# Altium footprint library Batterie_footprint.PcbLib: 69 footprints (part 4 of 5)
Each footprint in its own frame and in the unit in brackets; x right, y up, seen from the top. Pads: shape width x height; smd on the part's side, far side on the other; paste and mask are expansions set on the pad; w line width, h text height; cw(c..) or ccw(c..) is an arc to the next point about the centre after c.
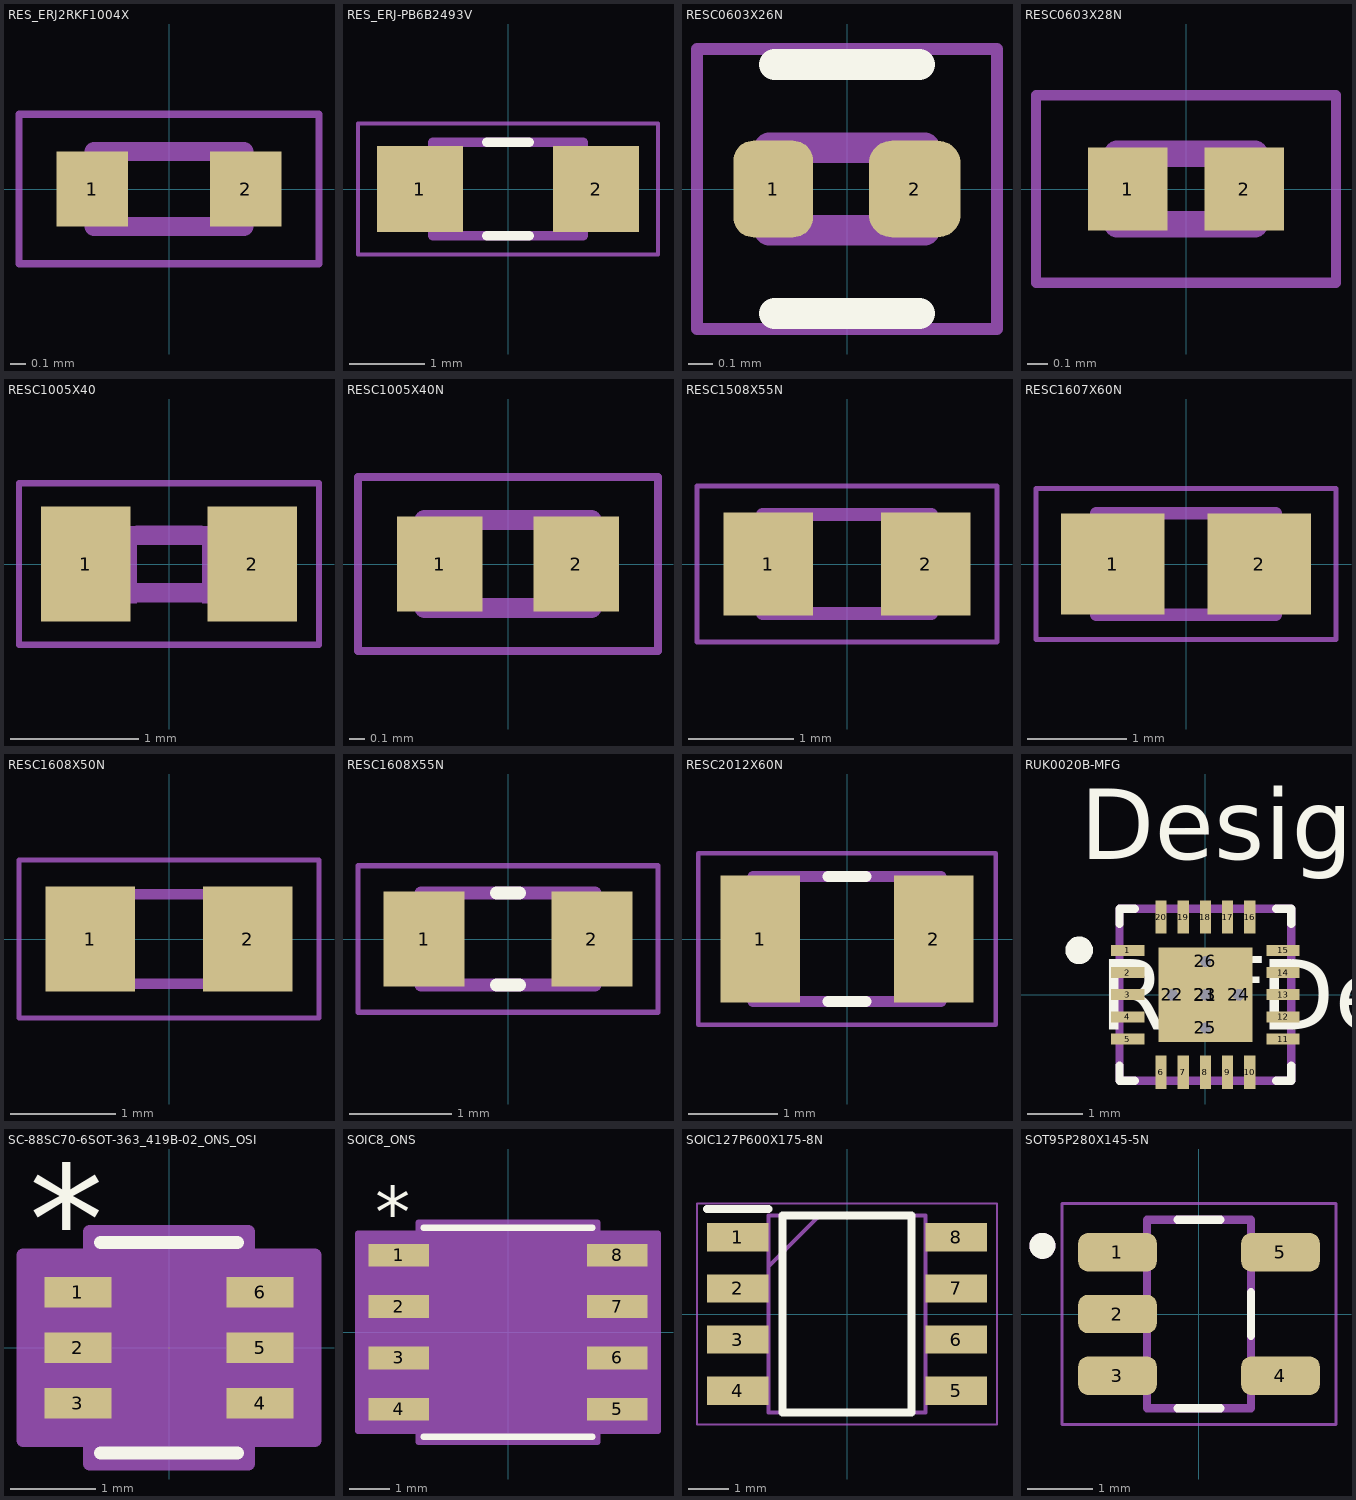
[diagram p3: the footprints below, top view; thin cyan lines are the x and y axes]

## RES_ERJ2RKF1004X [mm]
height 0.35
pads (2):
  rect 0.475x0.5 smd: 1(-0.512,0) 2(0.512,0)
Mechanical 13:
  lines w0.127: -0.5,-0.25 -0.5,0.25 0.5,0.25 0.5,-0.25 -0.5,-0.25
Mechanical 15:
  lines w0.05: -1,-0.5 -1,0.5 1,0.5 1,-0.5 -1,-0.5
3D body "step_temp.STEP": height 0.35, standoff 0, extent -0.5,-0.25 0.5,0.25

## RES_ERJ-PB6B2493V [mm]
height 0.55
pads (2):
  rect 1.15x1.15 smd: 1(-1.175,0) 2(1.175,0)
Top Overlay:
  lines w0.127: -0.28,-0.625 0.28,-0.625 ; -0.28,0.625 0.28,0.625
Mechanical 13:
  lines w0.127: -1,-0.625 1,-0.625 1,0.625 -1,0.625 -1,-0.625
Mechanical 15:
  lines w0.05: -2,-0.875 2,-0.875 2,0.875 -2,0.875 -2,-0.875

## RESC0603X26N [mm]
pads (2):
  rrect50% 0.33x0.4 smd: 1(-0.305,0)
  rrect50% 0.38x0.4 smd: 2(0.28,0)
Top Overlay:
  lines w0.127: -0.3,-0.515 0.3,-0.515 ; -0.3,0.515 0.3,0.515
Mechanical 13:
  lines w0.127: -0.32,-0.17 -0.32,0.17 0.32,0.17 0.32,-0.17 -0.32,-0.17
Mechanical 15:
  lines w0.05: -0.62,-0.579 -0.62,0.579 0.62,0.579 0.62,-0.579 -0.62,-0.579
3D body "step_temp.STEP": height 0.26, standoff 0, extent -0.3,-0.15 0.3,0.15

## RESC0603X28N [mm]
pads (2):
  rect 0.38x0.4 smd paste+0 mask+0.102: 1(-0.28,0) 2(0.28,0)
Mechanical 13:
  lines w0.127: -0.33,-0.17 0.33,-0.17 0.33,0.17 -0.33,0.17 -0.33,-0.17
Mechanical 15:
  lines w0.05: -0.72,-0.45 0.72,-0.45 0.72,0.45 -0.72,0.45 -0.72,-0.45
3D body "step_temp.STEP": height 0.28, standoff 0, extent -0.3,-0.15 0.3,0.15

## RESC1005X40 [mm]
pads (2):
  rect 0.7x0.9 smd: 1(-0.65,0) 2(0.65,0)
Mechanical 13:
  region: -0.254,-0.305 -0.555,-0.305 -0.555,0.295 -0.254,0.295
  region: 0.559,-0.305 0.259,-0.305 0.259,0.295 0.559,0.295
  lines w0.152: -0.245,-0.224 0.245,-0.224 ; -0.245,0.224 0.245,0.224
Mechanical 15:
  lines w0.051: -1.173,-0.633 1.173,-0.633 1.173,0.633 -1.173,0.633 -1.173,-0.633
3D body "step_temp.STEP": height 0.4, standoff 0, extent -0.5,-0.25 0.5,0.25

## RESC1005X40N [mm]
pads (2):
  rect 0.54x0.6 smd: 1(-0.432,0) 2(0.432,0)
Mechanical 13:
  lines w0.127: -0.53,-0.28 0.53,-0.28 0.53,0.28 -0.53,0.28 -0.53,-0.28
Mechanical 15:
  lines w0.05: -0.95,-0.55 0.95,-0.55 0.95,0.55 -0.95,0.55 -0.95,-0.55
3D body "step_temp.STEP": height 0.4, standoff 0, extent -0.5,-0.25 0.5,0.25

## RESC1508X55N [mm]
pads (2):
  rect 0.85x0.98 smd: 1(-0.75,0) 2(0.75,0)
Mechanical 13:
  lines w0.127: -0.8,-0.47 -0.8,0.47 0.8,0.47 0.8,-0.47 -0.8,-0.47
Mechanical 15:
  lines w0.05: -1.425,-0.74 -1.425,0.74 1.425,0.74 1.425,-0.74 -1.425,-0.74

## RESC1607X60N [mm]
pads (2):
  rect 1.04x1.02 smd: 1(-0.735,0) 2(0.735,0)
Mechanical 13:
  lines w0.127: -0.9,-0.51 0.9,-0.51 0.9,0.51 -0.9,0.51 -0.9,-0.51
Mechanical 15:
  lines w0.05: -1.508,-0.761 1.508,-0.761 1.508,0.761 -1.508,0.761 -1.508,-0.761
3D body "step_temp.STEP": height 0.55, standoff 0, extent -0.8,-0.4 0.8,0.4

## RESC1608X50N [mm]
pads (2):
  rect 0.85x1 smd: 1(-0.75,0) 2(0.75,0)
Mechanical 15:
  lines w0.1: -0.788,-0.425 0.788,-0.425 0.788,0.425 -0.788,0.425 -0.788,-0.425
Mechanical 20:
  lines w0.05: -1.425,-0.75 1.425,-0.75 1.425,0.75 -1.425,0.75 -1.425,-0.75

## RESC1608X55N [mm]
pads (2):
  rect 0.79x0.93 smd: 1(-0.82,0) 2(0.82,0)
Top Overlay:
  lines w0.127: -0.11,-0.45 0.11,-0.45 ; -0.11,0.45 0.11,0.45
Mechanical 13:
  lines w0.127: -0.85,-0.45 -0.85,0.45 0.85,0.45 0.85,-0.45 -0.85,-0.45
Mechanical 15:
  lines w0.05: -1.465,-0.715 -1.465,0.715 1.465,0.715 1.465,-0.715 -1.465,-0.715
3D body "step_temp.STEP": height 0.55, standoff 0, extent -0.8,-0.4 0.8,0.4

## RESC2012X60N [mm]
pads (2):
  rect 0.89x1.42 smd: 1(-0.97,0) 2(0.97,0)
Top Overlay:
  lines w0.127: -0.21,-0.7 0.21,-0.7 ; -0.21,0.7 0.21,0.7
Mechanical 13:
  lines w0.127: -1.05,-0.7 1.05,-0.7 1.05,0.7 -1.05,0.7 -1.05,-0.7
Mechanical 15:
  lines w0.05: -1.665,-0.96 1.665,-0.96 1.665,0.96 -1.665,0.96 -1.665,-0.96

## RUK0020B-MFG [mm]
pads (26):
  rect 0.6x0.2 smd paste+0 mask+0: 1(-1.4,0.8) 2(-1.4,0.4) 3(-1.4,0) 4(-1.4,-0.4) 5(-1.4,-0.8) 11(1.4,-0.8) 12(1.4,-0.4) 13(1.4,0) 14(1.4,0.4) 15(1.4,0.8)
  rect 0.2x0.6 smd paste+0 mask+0: 6(-0.8,-1.4) 7(-0.4,-1.4) 8(0,-1.4) 9(0.4,-1.4) 10(0.8,-1.4) 16(0.8,1.4) 17(0.4,1.4) 18(0,1.4) 19(-0.4,1.4) 20(-0.8,1.4)
  rect 1.7x1.7 smd paste-0.837 mask+0: 21(0,0)
  round 0.5 / inner round 1.524 / far side round 0.5 hole 0.203 paste-2539.97 mask-0.241: 22(-0.6,0) 23(0,0) 24(0.6,0) 25(0,-0.6) 26(0,0.6)
Top Overlay:
  circle w0.25: c-2.275,0.8 r0.125
  lines w0.15: -1.55,-1.275 -1.55,-1.55 -1.275,-1.55 ; -1.55,1.275 -1.55,1.55 -1.275,1.55 ; 1.275,-1.55 1.55,-1.55 1.55,-1.275 ; 1.275,1.55 1.55,1.55 1.55,1.275
  text "Designator718" at -2.261,2.438 h1.27
  text "RefDes" at -1.905,-0.635 h1.27
Top Paste:
  region: -0.795,0.845 -0.145,0.845 -0.095,0.795 -0.095,0.145 -0.145,0.095 -0.795,0.095 -0.845,0.145 -0.845,0.795
  region: 0.095,0.145 0.095,0.795 0.145,0.845 0.795,0.845 0.845,0.795 0.845,0.145 0.795,0.095 0.145,0.095
  region: -0.145,-0.845 -0.795,-0.845 -0.845,-0.795 -0.845,-0.145 -0.795,-0.095 -0.145,-0.095 -0.095,-0.145 -0.095,-0.795
  region: 0.095,-0.795 0.095,-0.145 0.145,-0.095 0.795,-0.095 0.845,-0.145 0.845,-0.795 0.795,-0.845 0.145,-0.845
Mechanical 13:
  lines w0.15: -1.55,-1.55 1.55,-1.55 1.55,1.55 -1.55,1.55 -1.55,-1.55
3D body "RUK0020B.stp": height 0.8, standoff 0, extent -1.5,-1.5 1.5,1.5

## SC-88SC70-6SOT-363_419B-02_ONS_OSI [mm]
pads (6):
  rect 0.782x0.355 smd paste+0 mask+0: 1(-1.064,0.65) 2(-1.064,0) 3(-1.064,-0.65) 4(1.064,-0.65) 5(1.064,0) 6(1.064,0.65)
Top Overlay:
  lines w0.152: -0.8,-1.232 0.8,-1.232 ; -0.8,1.232 0.8,1.232
  text ".Designator" at -3.492,-0.635 h1.27
  text "*" at -1.636,0.878 h1.27
Mechanical 13:
  lines w0.025: -0.305,1.105 ccw(c0,1.105) 0.305,1.105 ; -1.105,-0.802 -1.105,-0.498 -0.673,-0.498 -0.673,-0.802 -1.105,-0.802 ; -1.105,-0.152 -1.105,0.152 -0.673,0.152 -0.673,-0.152 -1.105,-0.152 ; -1.105,0.498 -1.105,0.802 -0.673,0.802 -0.673,0.498 -1.105,0.498 ; -0.673,-1.105 0.673,-1.105 0.673,1.105 -0.673,1.105 -0.673,-1.105 ; 0.673,-0.802 0.673,-0.498 1.105,-0.498 1.105,-0.802 0.673,-0.802 ; 0.673,-0.152 0.673,0.152 1.105,0.152 1.105,-0.152 0.673,-0.152 ; 0.673,0.498 0.673,0.802 1.105,0.802 1.105,0.498 0.673,0.498
  text "*" at -0.61,-0.241 h1.27
  text ".Designator" at -3.492,-0.635 h1.27
Mechanical 15:
  region: -0.927,-1.081 -1.709,-1.081 -1.709,1.081 -0.927,1.081 -0.927,1.359 0.927,1.359 0.927,1.081 1.709,1.081 1.709,-1.081 0.927,-1.081 0.927,-1.359 -0.927,-1.359
  lines w0.152: -1.709,-1.081 -1.709,1.081 -0.927,1.081 -0.927,1.359 0.927,1.359 0.927,1.081 1.709,1.081 1.709,-1.081 0.927,-1.081 0.927,-1.359 -0.927,-1.359 -0.927,-1.081 -1.709,-1.081
3D body "SC-88SC70-6SOT-363_419B-02_ONS_OSI.step": height 1.09, standoff 0, extent -1.105,-1.105 1.105,1.105

## SOIC8_ONS [mm]
pads (8):
  rect 1.493x0.558 smd paste+0 mask+0: 1(-2.702,1.905) 2(-2.702,0.635) 3(-2.702,-0.635) 4(-2.702,-1.905) 5(2.702,-1.905) 6(2.702,-0.635) 7(2.702,0.635) 8(2.702,1.905)
Top Overlay:
  lines w0.152: -2.083,-2.578 2.083,-2.578 ; -2.083,2.578 2.083,2.578
  text ".Designator" at -3.492,-0.635 h1.27
  text "*" at -3.274,2.336 h1.27
Mechanical 13:
  lines w0.025: -0.305,2.451 ccw(c0,2.451) 0.305,2.451 ; -3.099,-2.159 -3.099,-1.651 -1.956,-1.651 -1.956,-2.159 -3.099,-2.159 ; -3.099,-0.889 -3.099,-0.381 -1.956,-0.381 -1.956,-0.889 -3.099,-0.889 ; -3.099,0.381 -3.099,0.889 -1.956,0.889 -1.956,0.381 -3.099,0.381 ; -3.099,1.651 -3.099,2.159 -1.956,2.159 -1.956,1.651 -3.099,1.651 ; -1.956,-2.451 1.956,-2.451 1.956,2.451 -1.956,2.451 -1.956,-2.451 ; 1.956,-2.159 1.956,-1.651 3.099,-1.651 3.099,-2.159 1.956,-2.159 ; 1.956,-0.889 1.956,-0.381 3.099,-0.381 3.099,-0.889 1.956,-0.889 ; 1.956,0.381 1.956,0.889 3.099,0.889 3.099,0.381 1.956,0.381 ; 1.956,1.651 1.956,2.159 3.099,2.159 3.099,1.651 1.956,1.651
  text "*" at -1.892,1.105 h1.27
  text ".Designator" at -3.492,-0.635 h1.27
Mechanical 15:
  region: -2.21,-2.438 -3.703,-2.438 -3.703,2.438 -2.21,2.438 -2.21,2.705 2.21,2.705 2.21,2.438 3.703,2.438 3.703,-2.438 2.21,-2.438 2.21,-2.705 -2.21,-2.705
  lines w0.152: -3.703,-2.438 -3.703,2.438 -2.21,2.438 -2.21,2.705 2.21,2.705 2.21,2.438 3.703,2.438 3.703,-2.438 2.21,-2.438 2.21,-2.705 -2.21,-2.705 -2.21,-2.438 -3.703,-2.438
3D body "SOIC8_ONS.step": height 1.76, standoff 0, extent -3.099,-2.451 3.099,2.451

## SOIC127P600X175-8N [mm]
pads (8):
  rect 1.525x0.7 smd: 1(-2.712,1.905) 2(-2.712,0.635) 3(-2.712,-0.635) 4(-2.712,-1.905) 5(2.712,-1.905) 6(2.712,-0.635) 7(2.712,0.635) 8(2.712,1.905)
Top Overlay:
  lines w0.2: -3.475,2.605 -1.95,2.605 ; -1.6,-2.45 1.6,-2.45 1.6,2.45 -1.6,2.45 -1.6,-2.45
Mechanical 15:
  lines w0.1: -1.95,1.18 -0.68,2.45 ; -1.95,-2.45 1.95,-2.45 1.95,2.45 -1.95,2.45 -1.95,-2.45
Mechanical 20:
  lines w0.05: -3.725,-2.75 3.725,-2.75 3.725,2.75 -3.725,2.75 -3.725,-2.75

## SOT95P280X145-5N [mm]
pads (5):
  rrect50% 1.21x0.59 smd: 1(-1.255,0.95) 2(-1.255,0) 3(-1.255,-0.95) 4(1.255,-0.95) 5(1.255,0.95)
Top Overlay:
  circle w0.2: c-2.41,1.05 r0.1
  lines w0.127: -0.33,-1.45 0.33,-1.45 ; -0.33,1.45 0.33,1.45 ; 0.8,-0.335 0.8,0.335
Mechanical 13:
  circle w0.2: c-2.41,1.05 r0.1
  lines w0.127: -0.8,-1.45 -0.8,1.45 0.8,1.45 0.8,-1.45 -0.8,-1.45
Mechanical 15:
  lines w0.05: -2.11,-1.7 2.11,-1.7 2.11,1.7 -2.11,1.7 -2.11,-1.7
3D body "step_temp.STEP": height 1.45, standoff 0, extent -1.4,-1.45 1.4,1.45